# Altium footprint library Grant_..PcbLib: 97 footprints (part 7 of 7)
Each footprint in its own frame and in the unit in brackets; x right, y up, seen from the top. Pads: shape width x height; smd on the part's side, far side on the other; paste and mask are expansions set on the pad; w line width, h text height; cw(c..) or ccw(c..) is an arc to the next point about the centre after c.
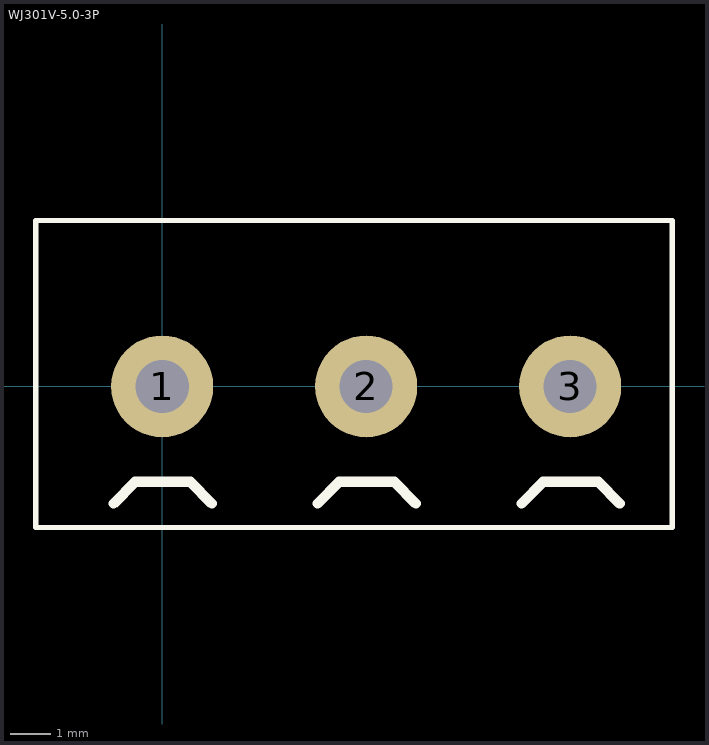
[diagram p6: the footprint, top view; thin cyan lines are the x and y axes]

## WJ301V-5.0-3P [mm]
pads (3):
  round 2.5 hole 1.3: 1(0,0) 2(5,0) 3(10,0)
Top Overlay:
  lines w0.127: -3.099,-3.454 12.5,-3.454 12.5,4.064 -3.099,4.064 -3.099,-3.454
  lines w0.254: -1.194,-2.87 -0.66,-2.337 0.686,-2.337 1.219,-2.87 ; 3.806,-2.87 4.34,-2.337 5.686,-2.337 6.219,-2.87 ; 8.806,-2.87 9.34,-2.337 10.686,-2.337 11.219,-2.87
3D body "3-pin.stp": height 10, standoff -4.2, extent -3.1,-3.445 12.5,4.054